# Altium integrated library S6B-PH-K-S_LF__SN_.IntLib: 1 symbol
Pins are listed as number, name and electrical type; pins without a type are passive.

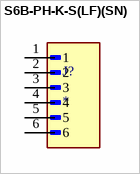
[diagram p0: symbol S6B-PH-K-S(LF)(SN)]

## S6B-PH-K-S(LF)(SN)
designator J?
Connector Header Through Hole, Right Angle 6 position 0.079 (2.00mm); MF: JST Sales; MP: S6B-PH-K-S(LF)(SN); SnapEDA_Link: https://www.snapeda.com/parts/S6B-PH-K-S(LF)(SN)/JST/view-part/?ref=snap; Package: NON STANDARD-6 J.S.T.; Value: *; Check_prices: https://www.snapeda.com/parts/S6B-PH-K-S(LF)(SN)/JST/view-part/?ref=eda
footprint JST_S6B-PH-K-S(LF)(SN)
pins: 1, 2, 3, 4, 5, 6